# Altium footprint library LimeMicroAltiumLib.PcbLib: 876 footprints (part 48 of 57)
Each footprint in its own frame and in the unit in brackets; x right, y up, seen from the top. Pads: shape width x height; smd on the part's side, far side on the other; paste and mask are expansions set on the pad; w line width, h text height; cw(c..) or ccw(c..) is an arc to the next point about the centre after c.
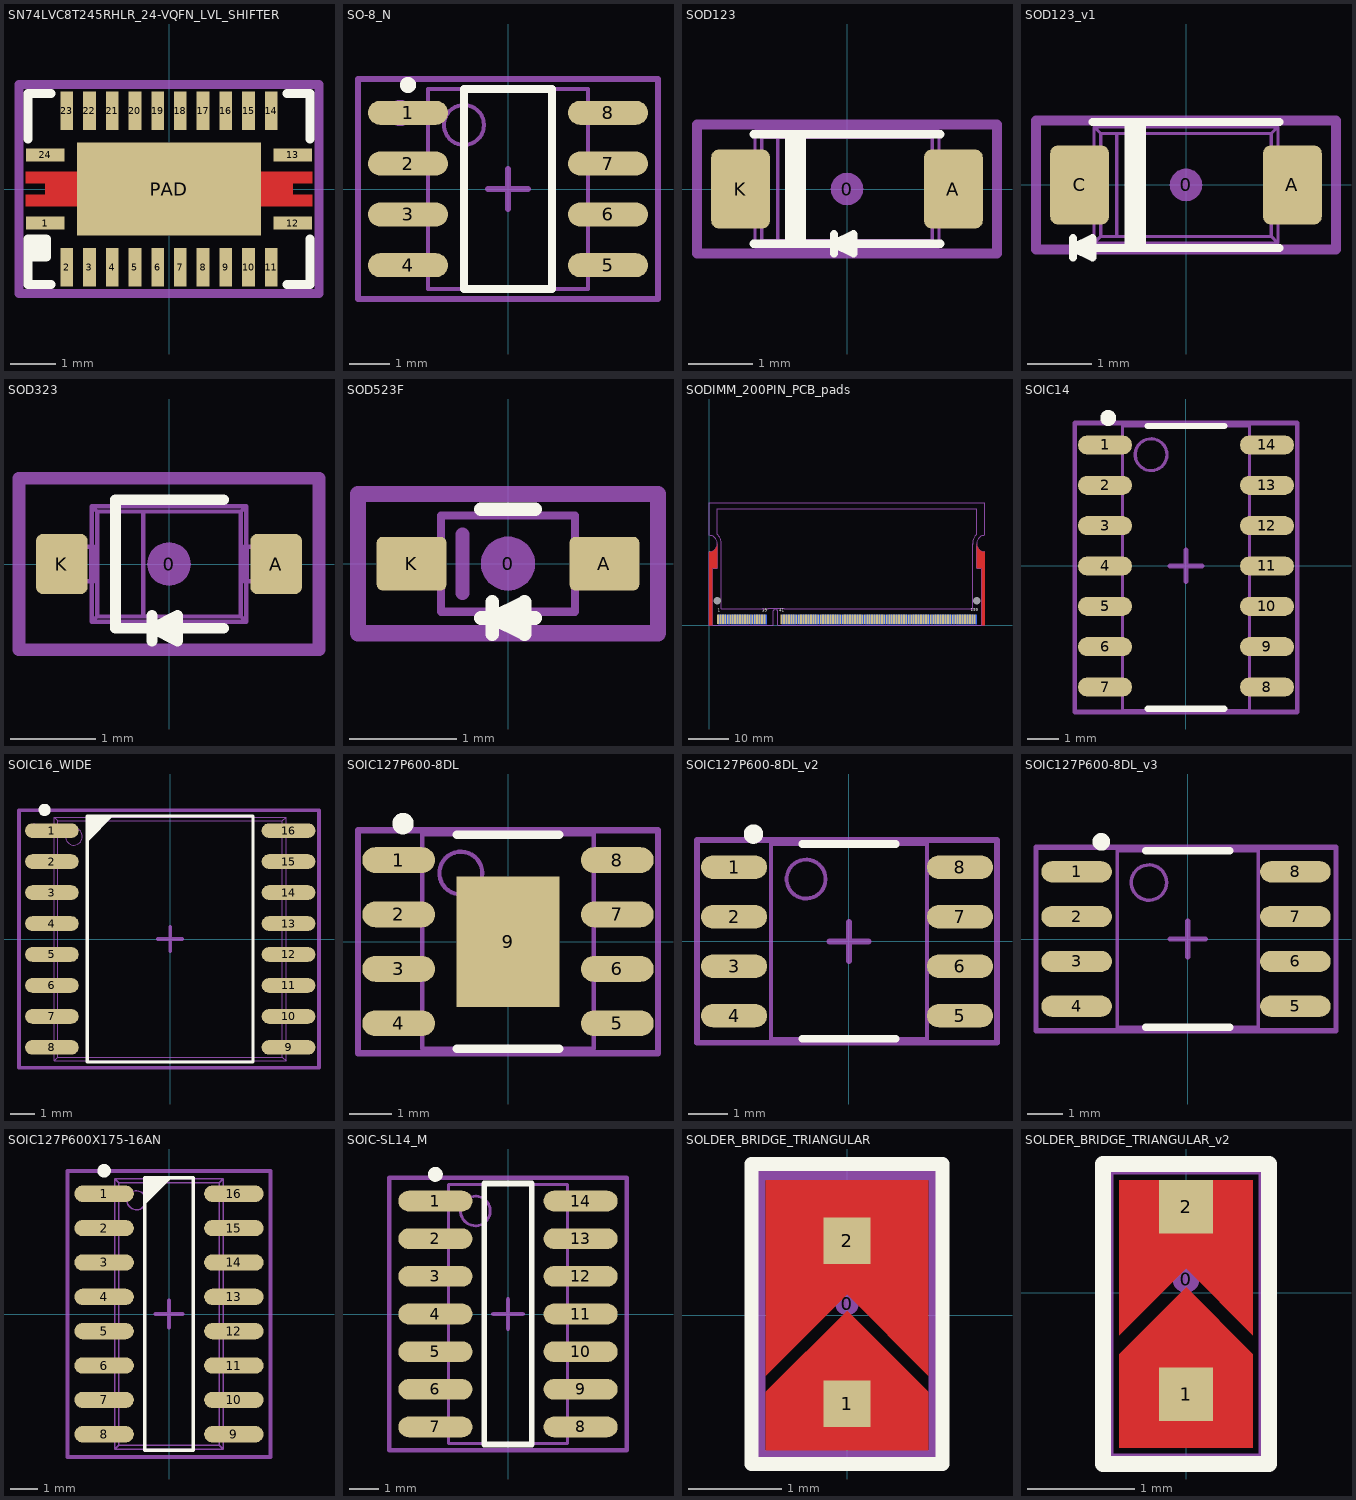
[diagram p47: the footprints below, top view; thin cyan lines are the x and y axes]

## SN74LVC8T245RHLR_24-VQFN_LVL_SHIFTER [mm]
pads (25):
  rect 0.85x0.28 smd mask+0.05: 1(-2.725,-0.75) 12(2.725,-0.75) 13(2.725,0.75) 24(-2.725,0.75)
  rect 0.28x0.85 smd mask+0.05: 2(-2.25,-1.725) 3(-1.75,-1.725) 4(-1.25,-1.725) 5(-0.75,-1.725) 6(-0.25,-1.725) 7(0.25,-1.725) 8(0.75,-1.725) 9(1.25,-1.725) 10(1.75,-1.725) 11(2.25,-1.725) 14(2.25,1.725) 15(1.75,1.725) 16(1.25,1.725) 17(0.75,1.725) 18(0.25,1.725) 19(-0.25,1.725) 20(-0.75,1.725) 21(-1.25,1.725) 22(-1.75,1.725) 23(-2.25,1.725)
  rect 4.05x2.05 smd paste-4 mask+0.05: PAD(0,0)
Top Layer:
  region: -3.15,0.375 -1.95,0.375 -1.95,0 -2.725,0 -2.725,0.125 -3.15,0.125
  region: -3.15,-0.375 -1.95,-0.375 -1.95,0 -2.725,0 -2.725,-0.125 -3.15,-0.125
  region: 3.15,-0.375 1.95,-0.375 1.95,0 2.725,0 2.725,-0.125 3.15,-0.125
  region: 3.15,0.375 1.95,0.375 1.95,0 2.725,0 2.725,0.125 3.15,0.125
Top Overlay:
  region: -3.1,-1.5 -2.7,-1.5 -2.7,-1.1 -3.1,-1.1
  lines w0.2: -3.1,-1.5 -2.7,-1.5 -2.7,-1.1 -3.1,-1.1 -3.1,-2.1 -2.6,-2.1 ; -3.1,1.1 -3.1,2.1 -2.6,2.1 ; 2.6,-2.1 3.1,-2.1 3.1,-1.1 ; 2.6,2.1 3.1,2.1 3.1,1.1
Top Paste:
  region: 3.15,-0.125 2.175,-0.125 2.175,-0.375 3.15,-0.375
  region: 3.15,0.375 2.175,0.375 2.175,0.125 3.15,0.125
  region: -3.15,0.375 -2.175,0.375 -2.175,0.125 -3.15,0.125
  region: -3.15,-0.125 -2.175,-0.125 -2.175,-0.375 -3.15,-0.375
  region: -1.9,-1
  region: 0,0
  region: 2,0
  region: -0.3,1.1
  region: -1.95,0.15 -1.95,0.95 -0.85,0.95 -0.85,0.15
  region: -1.95,-0.15 -1.95,-0.95 -0.85,-0.95 -0.85,-0.15
  region: -0.55,-0.15 -0.55,-0.95 0.55,-0.95 0.55,-0.15
  region: -0.55,0.15 -0.55,0.95 0.55,0.95 0.55,0.15
  region: 1.95,-0.15 1.95,-0.95 0.85,-0.95 0.85,-0.15
  region: 1.95,0.15 1.95,0.95 0.85,0.95 0.85,0.15
Top Solder:
  region: -3.2,0.425 -1.95,0.425 -1.95,0 -2.775,0 -2.775,0.075 -3.2,0.075
  region: -3.2,-0.425 -1.95,-0.425 -1.95,0 -2.775,0 -2.775,-0.075 -3.2,-0.075
  region: 3.2,-0.425 1.95,-0.425 1.95,0 2.775,0 2.775,-0.075 3.2,-0.075
  region: 3.2,0.425 1.95,0.425 1.95,0 2.775,0 2.775,0.075 3.2,0.075
Mechanical 15:
  lines w0.2: -0.6,0 0,0 ; 0,-0.6 0,0 ; 0,0.6 0,0 ; 0.6,0 0,0 ; -3.3,-2.3 3.3,-2.3 3.3,2.3 -3.3,2.3 -3.3,-2.3
  text ".Designator" at 0,0 h0.55
  text "24" at -3.1,0.3 h0.55
  text "23" at -2.8,1.2 h0.55
  text "14" at 1.8,1.3 h0.55
  text "13" at 2,0.4 h0.55
  text "12" at 2,-1.2 h0.55
  text "11" at 1.9,-2.1 h0.55
  text "2" at -2.5,-2.1 h0.55
  text "1" at -2.8,-1.2 h0.55
3D body "User Library-PVQFN-24.step": height 1.01, standoff -0.01, extent -2.825,-1.825 2.825,1.825

## SO-8_N [mm] "SOIC, 8-Leads, Body 4.9x3.9mm, Pitch 1.27mm, IPC Medium Density"
height 1.75
pads (8):
  oval 2x0.6 smd: 1(-2.5,1.905) 2(-2.5,0.635) 3(-2.5,-0.635) 4(-2.5,-1.905) 5(2.5,-1.905) 6(2.5,-0.635) 7(2.5,0.635) 8(2.5,1.905)
Top Overlay:
  circle w0.2: c-2.5,2.6 r0.1
  lines w0.2: -1.1,-2.5 -1.1,2.5 1.1,2.5 1.1,-2.5 -1.1,-2.5
Mechanical 13:
  circle w0.1: c-1.1,1.6 r0.5
  lines w0.1: -2,-2.5 -2,2.5 2,2.5 2,-2.5 -2,-2.5
Mechanical 15:
  circle w0.35: c-2.7,1.9 r0.15
  lines w0.15: -0.5,0 0.5,0 ; 0,-0.5 0,0.5 ; -3.75,-2.75 -3.75,2.75 3.75,2.75 3.75,-2.75 -3.75,-2.75
  text ".Designator" at 0,0 h0.55
3D body "CircuitWorks-SO-8.step": height 1.45, standoff 0, extent -2.889,-2.452 2.889,2.45

## SOD123 [mm] "SOD-123; 2 Leads; Body 2.7 x 1.6 mm, (LxW)"
height 1.35
pads (3):
  round 0.508 on Mech15: 0(0,0)
  rrect25% 0.91x1.22 smd: A(1.65,0) K(-1.65,0)
Top Overlay:
  lines w0.127: -1.45,-0.85 1.448,-0.85 ; -1.45,0.85 1.45,0.85 ; -0.9,-0.85 -0.9,0.85 ; -0.8,-0.85 -0.8,0.85 ; -0.7,-0.85 -0.7,0.85 ; -0.2,-1 -0.2,-0.7 ; 0.1,-0.85 -0.2,-0.85 ; -0.2,-0.85 0.1,-0.7 0.1,-1 -0.2,-0.85
Mechanical 13:
  lines w0.05: -1.766,-0.308 -1.766,0.308 ; -1.707,-0.308 -1.707,0.308 ; -1.517,-0.308 -1.517,0.308 ; -1.425,-0.308 -1.95,-0.308 -1.95,0.308 -1.425,0.308 ; 1.425,-0.308 1.95,-0.308 1.95,0.308 1.425,0.308 ; 1.517,-0.308 1.517,0.308 ; 1.707,-0.308 1.707,0.308 ; 1.766,-0.308 1.766,0.308 ; -1.425,-0.9 -1.425,0.9 ; -1.425,-0.9 -1.323,-0.798 ; -1.425,-0.9 1.425,-0.9 ; -1.425,0.9 1.425,0.9 ; -1.425,0.9 -1.323,0.798 ; -1.323,-0.798 -1.323,0.798 ; -1.323,-0.798 -1.072,-0.798 ; -1.323,0.798 -1.072,0.798 ; -1.072,-0.798 -1.072,0.798 ; -1.072,-0.798 1.322,-0.797 ; -1.072,0.798 1.322,0.797 ; 1.322,-0.797 1.425,-0.9 ; 1.322,-0.797 1.322,0.797 ; 1.322,0.797 1.425,0.9 ; 1.425,-0.9 1.425,0.9
Mechanical 15:
  lines w0.15: -2.325,-1 -2.325,1 2.325,1 2.325,-1 -2.325,-1
  text ".Designator" at 0,0 h0.55
  text "C" at -1.9,-0.275 h0.55
  text "A" at 1.475,-0.275 h0.55
3D body "SOD123.STEP": height 1.18, standoff 0, extent -1.95,-0.9 1.95,0.9

## SOD123_v1 [mm] "SOD-123; 2 Leads; Body 2.7 x 1.6 mm, (LxW)"
height 1.35
pads (3):
  round 0.508 on Mech15: 0(0,0)
  rrect25% 0.91x1.22 smd: A(1.65,0) C(-1.65,0)
Top Overlay:
  region: -0.95,0.975 -0.95,-0.975 -0.625,-0.975 -0.625,0.975
  lines w0.127: -1.75,-1.125 -1.75,-0.825 ; -1.45,0.975 1.45,0.975 ; 1.448,-0.975 -1.45,-0.975 -1.75,-0.975 ; -1.75,-0.975 -1.45,-1.125 -1.45,-0.825 -1.75,-0.975
Mechanical 13:
  lines w0.05: -1.766,-0.308 -1.766,0.308 ; -1.707,-0.308 -1.707,0.308 ; -1.517,-0.308 -1.517,0.308 ; -1.425,-0.308 -1.95,-0.308 -1.95,0.308 -1.425,0.308 ; 1.425,-0.308 1.95,-0.308 1.95,0.308 1.425,0.308 ; 1.517,-0.308 1.517,0.308 ; 1.707,-0.308 1.707,0.308 ; 1.766,-0.308 1.766,0.308 ; -1.425,-0.9 1.425,-0.9 ; -1.425,-0.9 -1.323,-0.798 ; -1.425,-0.9 -1.425,0.9 ; -1.425,0.9 -1.323,0.798 ; -1.425,0.9 1.425,0.9 ; -1.323,-0.798 -1.072,-0.798 ; -1.323,-0.798 -1.323,0.798 ; -1.323,0.798 -1.072,0.798 ; -1.072,-0.798 1.322,-0.797 ; -1.072,-0.798 -1.072,0.798 ; -1.072,0.798 1.322,0.797 ; 1.322,-0.797 1.322,0.797 ; 1.322,-0.797 1.425,-0.9 ; 1.322,0.797 1.425,0.9 ; 1.425,-0.9 1.425,0.9
Mechanical 15:
  lines w0.15: -2.325,-1 2.325,-1 2.325,1 -2.325,1 -2.325,-1
  text "A" at 1.475,-0.275 h0.55
  text "C" at -1.9,-0.275 h0.55
  text ".Designator" at 0,0 h0.55
3D body "SOD123.STEP": height 1.18, standoff 0, extent -1.95,-0.9 1.95,0.9

## SOD323 [mm] "SOD-323; 2 Leads; Body 1.8 x 1.35 mm, (LxW)"
height 1.15
pads (3):
  round 0.508 on Mech15: 0(0,0)
  rrect25% 0.6x0.7 smd: A(1.25,0) K(-1.25,0)
Top Overlay:
  lines w0.127: -0.2,-0.9 -0.2,-0.6 ; 0.1,-0.75 -0.2,-0.75 ; 0.635,-0.75 -0.625,-0.75 -0.625,0.75 0.635,0.75 ; -0.2,-0.75 0.1,-0.6 0.1,-0.9 -0.2,-0.75
Mechanical 13:
  lines w0.05: -1.157,-0.2 -1.157,0.2 ; -1.11,-0.2 -1.11,0.2 ; -0.91,-0.2 -0.91,0.2 ; -0.9,-0.2 -0.9,-0.675 ; -0.9,0.2 -0.9,0.675 ; 0.9,-0.2 0.9,-0.675 ; 0.9,0.2 0.9,0.675 ; 0.91,-0.2 0.91,0.2 ; 1.11,-0.2 1.11,0.2 ; 1.157,-0.2 1.157,0.2 ; -0.9,-0.675 0.9,-0.675 ; -0.9,-0.675 -0.838,-0.613 ; -0.9,0.675 -0.838,0.613 ; -0.9,0.675 0.9,0.675 ; -0.838,-0.613 -0.3,-0.613 ; -0.838,-0.613 -0.838,0.613 ; -0.838,0.613 -0.3,0.613 ; -0.3,-0.613 0.838,-0.613 ; -0.3,-0.613 -0.3,0.613 ; -0.3,0.613 0.838,0.613 ; 0.838,-0.613 0.9,-0.675 ; 0.838,-0.613 0.838,0.613 ; 0.838,0.613 0.9,0.675 ; -1.3,-0.2 -0.879,-0.2 -0.879,0.2 -1.3,0.2 -1.3,-0.2 ; 0.879,-0.2 0.879,0.2 1.3,0.2 1.3,-0.2 0.879,-0.2
Mechanical 15:
  lines w0.15: -1.75,-1 1.75,-1 1.75,1 -1.75,1 -1.75,-1
  text "C" at -1.425,-0.25 h0.55
  text "A" at 1.05,-0.25 h0.55
  text ".Designator" at 0,0 h0.55
3D body "SOD323.STEP": height 1.1, standoff 0, extent -1.3,-0.675 1.3,0.675

## SOD523F [mm] "SOD-523F; 2 Leads; Body 1.3 x 0.9 mm, (LxW)"
height 0.7
pads (3):
  round 0.508 on Mech15: 0(0,0)
  rrect20% 0.65x0.5 smd: A(0.9,0) K(-0.9,0)
Top Overlay:
  lines w0.127: -0.254,-0.508 0.254,-0.508 ; -0.254,0.508 0.254,0.508 ; -0.146,-0.658 -0.146,-0.358 ; 0.154,-0.508 -0.146,-0.508 ; -0.146,-0.508 0.154,-0.358 0.154,-0.658 -0.146,-0.508
Mechanical 13:
  lines w0.076: -0.625,-0.175 -0.85,-0.175 -0.85,0.175 -0.625,0.175 ; -0.625,-0.175 -0.625,-0.45 0.625,-0.45 0.625,-0.175 ; -0.625,-0.175 -0.625,0.175 ; -0.625,0.175 -0.625,0.45 0.625,0.45 0.625,0.175 ; 0.625,-0.175 0.85,-0.175 0.85,0.175 0.625,0.175 ; 0.625,-0.175 0.625,0.175
  lines w0.127: -0.425,-0.275 -0.425,0.275
Mechanical 15:
  lines w0.15: -1.4,-0.65 -1.4,0.65 1.4,0.65 1.4,-0.65 -1.4,-0.65
  text ".Designator" at 0,0 h0.55
  text "A" at 0.725,-0.3 h0.55
  text "C" at -1.075,-0.275 h0.55
3D body "SOD-523F.STEP": height 0.7, standoff 0, extent -0.85,-0.45 0.85,0.45

## SODIMM_200PIN_PCB_pads [mm] "SODIMM 200PIN card PCB fingers"
pads (202):
  rect 0.45x2.3 smd paste+0.3 mask+0.3: 1(2.15,1.4) 3(2.75,1.4) 5(3.35,1.4) 7(3.95,1.4) 9(4.55,1.4) 11(5.15,1.4) 13(5.75,1.4) 15(6.35,1.4) 17(6.95,1.4) 19(7.55,1.4) 21(8.15,1.4) 23(8.75,1.4) 25(9.35,1.4) 27(9.95,1.4) 29(10.55,1.4) 31(11.15,1.4) 33(11.75,1.4) 35(12.35,1.4) 37(12.95,1.4) 39(13.55,1.4) 41(17.75,1.4) 43(18.35,1.4) 45(18.95,1.4) 47(19.55,1.4) 49(20.15,1.4) 51(20.75,1.4) 53(21.35,1.4) 55(21.95,1.4) 57(22.55,1.4) 59(23.15,1.4) 61(23.75,1.4) 63(24.35,1.4) 65(24.95,1.4) 67(25.55,1.4) 69(26.15,1.4) 71(26.75,1.4) 73(27.35,1.4) 75(27.95,1.4) 77(28.55,1.4) 79(29.15,1.4) 81(29.75,1.4) 83(30.35,1.4) 85(30.95,1.4) 87(31.55,1.4) 89(32.15,1.4) 91(32.75,1.4) 93(33.35,1.4) 95(33.95,1.4) 97(34.55,1.4) 99(35.15,1.4) 101(35.75,1.4) 103(36.35,1.4) 105(36.95,1.4) 107(37.55,1.4) 109(38.15,1.4) 111(38.75,1.4) 113(39.35,1.4) 115(39.95,1.4) 117(40.55,1.4) 119(41.15,1.4) 121(41.75,1.4) 123(42.35,1.4) 125(42.95,1.4) 127(43.55,1.4) 129(44.15,1.4) 131(44.75,1.4) 133(45.35,1.4) 135(45.95,1.4) 137(46.55,1.4) 139(47.15,1.4) 141(47.75,1.4) 143(48.35,1.4) 145(48.95,1.4) 147(49.55,1.4) 149(50.15,1.4) 151(50.75,1.4) 153(51.35,1.4) 155(51.95,1.4) 157(52.55,1.4) 159(53.15,1.4) 161(53.75,1.4) 163(54.35,1.4) 165(54.95,1.4) 167(55.55,1.4) 169(56.15,1.4) 171(56.75,1.4) 173(57.35,1.4) 175(57.95,1.4) 177(58.55,1.4) 179(59.15,1.4) 181(59.75,1.4) 183(60.35,1.4) 185(60.95,1.4) 187(61.55,1.4) 189(62.15,1.4) 191(62.75,1.4) 193(63.35,1.4) 195(63.95,1.4) 197(64.55,1.4) 199(65.15,1.4)
  rect 0.45x2.3 smd far side paste+0.3 mask+0.3: 2(2.45,1.4) 4(3.05,1.4) 6(3.65,1.4) 8(4.25,1.4) 10(4.85,1.4) 12(5.45,1.4) 14(6.05,1.4) 16(6.65,1.4) 18(7.25,1.4) 20(7.85,1.4) 22(8.45,1.4) 24(9.05,1.4) 26(9.65,1.4) 28(10.25,1.4) 30(10.85,1.4) 32(11.45,1.4) 34(12.05,1.4) 36(12.65,1.4) 38(13.25,1.4) 40(13.85,1.4) 42(18.05,1.4) 44(18.65,1.4) 46(19.25,1.4) 48(19.85,1.4) 50(20.45,1.4) 52(21.05,1.4) 54(21.65,1.4) 56(22.25,1.4) 58(22.85,1.4) 60(23.45,1.4) 62(24.05,1.4) 64(24.65,1.4) 66(25.25,1.4) 68(25.85,1.4) 70(26.45,1.4) 72(27.05,1.4) 74(27.65,1.4) 76(28.25,1.4) 78(28.85,1.4) 80(29.45,1.4) 82(30.05,1.4) 84(30.65,1.4) 86(31.25,1.4) 88(31.85,1.4) 90(32.45,1.4) 92(33.05,1.4) 94(33.65,1.4) 96(34.25,1.4) 98(34.85,1.4) 100(35.45,1.4) 102(36.05,1.4) 104(36.65,1.4) 106(37.25,1.4) 108(37.85,1.4) 110(38.45,1.4) 112(39.05,1.4) 114(39.65,1.4) 116(40.25,1.4) 118(40.85,1.4) 120(41.45,1.4) 122(42.05,1.4) 124(42.65,1.4) 126(43.25,1.4) 128(43.85,1.4) 130(44.45,1.4) 132(45.05,1.4) 134(45.65,1.4) 136(46.25,1.4) 138(46.85,1.4) 140(47.45,1.4) 142(48.05,1.4) 144(48.65,1.4) 146(49.25,1.4) 148(49.85,1.4) 150(50.45,1.4) 152(51.05,1.4) 154(51.65,1.4) 156(52.25,1.4) 158(52.85,1.4) 160(53.45,1.4) 162(54.05,1.4) 164(54.65,1.4) 166(55.25,1.4) 168(55.85,1.4) 170(56.45,1.4) 172(57.05,1.4) 174(57.65,1.4) 176(58.25,1.4) 178(58.85,1.4) 180(59.45,1.4) 182(60.05,1.4) 184(60.65,1.4) 186(61.25,1.4) 188(61.85,1.4) 190(62.45,1.4) 192(63.05,1.4) 194(63.65,1.4) 196(64.25,1.4) 198(64.85,1.4) 200(65.45,1.4)
  round 1.5 hole 1.8 unplated: MH1(2,6) MH2(65.6,6)
Top Layer:
  pour cut-out: 67.6,0 66.8,0 66.8,14 65.6,14 65.592,20 65.602,19.804 65.678,19.419 65.828,19.057 66.046,18.731 66.323,18.454 66.649,18.236 67.011,18.086 67.396,18.01 67.592,18 67.6,18
  pour cut-out: 0,0 0.8,0 0.8,14 2,14 2.008,20 1.998,19.804 1.922,19.419 1.772,19.057 1.554,18.731 1.277,18.454 0.951,18.236 0.589,18.086 0.204,18.01 0.008,18 0,18
Bottom Layer:
  pour cut-out: 67.6,0 66.8,0 66.8,14 65.6,14 65.592,20 65.602,19.804 65.678,19.419 65.828,19.057 66.046,18.731 66.323,18.454 66.649,18.236 67.011,18.086 67.396,18.01 67.592,18 67.6,18
  pour cut-out: 0,0 0.8,0 0.8,14 2,14 2.008,20 1.998,19.804 1.922,19.419 1.772,19.057 1.554,18.731 1.277,18.454 0.951,18.236 0.589,18.086 0.204,18.01 0.008,18 0,18
Top Overlay:
  text "199" at 64.2,3.4 h0.7
  text "41" at 17.2,3.3 h0.7
  text "39" at 13,3.3 h0.7
  text "1" at 2.1,3.3 h0.7
Mechanical 13:
  lines w0.2: 0,0 0,18 ccw(c0,20) 0,22 0,30 67.6,30 67.6,22 ccw(c67.6,20) 67.6,18 67.6,0 16.75,0 16.75,3.5 ccw(c16.25,3.5) 15.75,3.5 15.75,0 0,0
Mechanical 15:
  lines w0.15: 0,1.8 0.8,0.5 ; 0,3.3 0.8,2 ; 0,4.8 0.8,3.5 ; 0,6.3 0.8,5 ; 0,7.8 0.8,6.5 ; 0,9.3 0.8,8 ; 0,10.8 0.8,9.5 ; 0,12.3 0.8,11 ; 0,13.8 0.8,12.5 ; 0,15.3 0.8,14 ; 0,16.5 0.494,15.697 ; 0,17.5 0.494,16.697 ; 0.8,0 0.8,14 ; 1.5,14.8 1.994,13.997 ; 1.5,15.9 1.994,15.097 ; 1.5,16.9 1.994,16.097 ; 1.5,18 1.994,17.197 ; 2,19.4 2,14 0.8,14 ; 65.6,19.4 65.6,14 66.8,14 ; 65.606,13.997 66.1,14.8 ; 65.606,15.097 66.1,15.9 ; 65.606,16.097 66.1,16.9 ; 65.606,17.197 66.1,18 ; 66.8,0 66.8,14 ; 66.8,0.5 67.6,1.8 ; 66.8,2 67.6,3.3 ; 66.8,3.5 67.6,4.8 ; 66.8,5 67.6,6.3 ; 66.8,6.5 67.6,7.8 ; 66.8,8 67.6,9.3 ; 66.8,9.5 67.6,10.8 ; 66.8,11 67.6,12.3 ; 66.8,12.5 67.6,13.8 ; 67.106,15.697 67.6,16.5 ; 67.106,16.697 67.6,17.5 ; 67.6,15.3 66.8,14
  lines w0.2: 1.997,22.239 cw(c0,20) 3,20 3,4 14.45,4 14.45,4.2 18.45,4.2 18.45,4 64.6,4 64.602,20 ; 2,22.242 2,28.5 65.6,28.5 65.6,22.229 ; 64.602,19.889 cw(c67.6,20) 65.592,22.229 ; 0,0 15.75,0 15.75,3.5 cw(c16.25,3.5) 16.75,3.5 16.75,0 67.6,0 67.6,18 cw(c67.6,20) 67.6,22 67.6,30 0,30 0,22 cw(c0,20) 0,18 0,0
  text "Keep Out" at 67,14.2 h0.5
  text "Keep Out" at 1.594,14.203 h0.5

## SOIC14 [mm] "14-Pin Small Outline Integrated Circuit 1.27 mm Pitch"
height 1.55
pads (14):
  oval 1.7x0.6 smd: 1(-2.55,3.81) 2(-2.55,2.54) 3(-2.55,1.27) 4(-2.55,0) 5(-2.55,-1.27) 6(-2.55,-2.54) 7(-2.55,-3.81) 8(2.55,-3.81) 9(2.55,-2.54) 10(2.55,-1.27) 11(2.55,0) 12(2.55,1.27) 13(2.55,2.54) 14(2.55,3.81)
Top Overlay:
  circle w0.25: c-2.45,4.66 r0.125
  lines w0.2: -1.2,-4.5 1.2,-4.5 ; -1.2,4.405 1.2,4.405
Mechanical 13:
  circle w0.1: c-1.1,3.505 r0.5
  lines w0.1: -2,-4.545 2,-4.545 2,4.405 -2,4.405 -2,-4.545
Mechanical 15:
  circle w0.35: c-2.6,3.805 r0.1
  lines w0.15: -0.5,0 0.5,0 ; 0,-0.5 0,0.5 ; -3.5,-4.6 3.5,-4.6 3.5,4.505 -3.5,4.505 -3.5,-4.6
  text ".Designator" at 0,0 h0.55
3D body "User Library-SOIC127P600-14.step": height 1.65, standoff 0, extent -3.065,-4.325 3.015,4.275

## SOIC16_WIDE [mm] "SOIC, 1.27mm pitch, 16 pin"
height 1.75
pads (16):
  oval 2.2x0.6 smd: 1(-4.85,4.445) 2(-4.85,3.175) 3(-4.85,1.905) 4(-4.85,0.635) 5(-4.85,-0.635) 6(-4.85,-1.905) 7(-4.85,-3.175) 8(-4.85,-4.445) 9(4.85,-4.445) 10(4.85,-3.175) 11(4.85,-1.905) 12(4.85,-0.635) 13(4.85,0.635) 14(4.85,1.905) 15(4.85,3.175) 16(4.85,4.445)
Top Overlay:
  circle w0.25: c-5.15,5.295 r0.125
  region: -3.35,5.035 -2.35,5.035 -3.35,4.035
  lines w0.127: -3.4,-5.035 -3.4,5.035 3.4,5.035 3.4,-5.035 -3.4,-5.035
Mechanical 13:
  circle w0.05: c-3.95,4.2 r0.35
  lines w0.05: -5.381,-4.655 -5.381,-4.235 ; -5.381,-3.385 -5.381,-2.965 ; -5.381,-2.115 -5.381,-1.695 ; -5.381,-0.845 -5.381,-0.425 ; -5.381,0.425 -5.381,0.845 ; -5.381,1.695 -5.381,2.115 ; -5.381,2.965 -5.381,3.385 ; -5.381,4.235 -5.381,4.655 ; -5.293,-4.655 -5.293,-4.235 ; -5.293,-3.385 -5.293,-2.965 ; -5.293,-2.115 -5.293,-1.695 ; -5.293,-0.845 -5.293,-0.425 ; -5.293,0.425 -5.293,0.845 ; -5.293,1.695 -5.293,2.115 ; -5.293,2.965 -5.293,3.385 ; -5.293,4.235 -5.293,4.655 ; -5.153,-4.655 -5.153,-4.235 ; -5.153,-3.385 -5.153,-2.965 ; -5.153,-2.115 -5.153,-1.695 ; -5.153,-0.845 -5.153,-0.425 ; -5.153,0.425 -5.153,0.845 ; -5.153,1.695 -5.153,2.115 ; -5.153,2.965 -5.153,3.385 ; -5.153,4.235 -5.153,4.655 ; -4.863,-4.655 -4.863,-4.235 ; -4.863,-3.385 -4.863,-2.965 ; -4.863,-2.115 -4.863,-1.695 ; -4.863,-0.845 -4.863,-0.425 ; -4.863,0.425 -4.863,0.845 ; -4.863,1.695 -4.863,2.115 ; -4.863,2.965 -4.863,3.385 ; -4.863,4.235 -4.863,4.655 ; -4.75,-4.655 -5.75,-4.655 -5.75,-4.235 -4.75,-4.235 ; -4.75,-3.385 -5.75,-3.385 -5.75,-2.965 -4.75,-2.965 ; -4.75,-2.115 -5.75,-2.115 -5.75,-1.695 -4.75,-1.695 ; -4.75,-0.845 -5.75,-0.845 -5.75,-0.425 -4.75,-0.425 ; -4.75,0.425 -5.75,0.425 -5.75,0.845 -4.75,0.845 ; -4.75,1.695 -5.75,1.695 -5.75,2.115 -4.75,2.115 ; -4.75,2.965 -5.75,2.965 -5.75,3.385 -4.75,3.385 ; -4.75,4.235 -5.75,4.235 -5.75,4.655 -4.75,4.655 ; 4.75,-4.655 5.75,-4.655 5.75,-4.235 4.75,-4.235 ; 4.75,-3.385 5.75,-3.385 5.75,-2.965 4.75,-2.965 ; 4.75,-2.115 5.75,-2.115 5.75,-1.695 4.75,-1.695 ; 4.75,-0.845 5.75,-0.845 5.75,-0.425 4.75,-0.425 ; 4.75,0.425 5.75,0.425 5.75,0.845 4.75,0.845 ; 4.75,1.695 5.75,1.695 5.75,2.115 4.75,2.115 ; 4.75,2.965 5.75,2.965 5.75,3.385 4.75,3.385 ; 4.75,4.235 5.75,4.235 5.75,4.655 4.75,4.655 ; 4.863,-4.655 4.863,-4.235 ; 4.863,-3.385 4.863,-2.965 ; 4.863,-2.115 4.863,-1.695 ; 4.863,-0.845 4.863,-0.425 ; 4.863,0.425 4.863,0.845 ; 4.863,1.695 4.863,2.115 ; 4.863,2.965 4.863,3.385 ; 4.863,4.235 4.863,4.655 ; 5.153,-4.655 5.153,-4.235 ; 5.153,-3.385 5.153,-2.965 ; 5.153,-2.115 5.153,-1.695 ; 5.153,-0.845 5.153,-0.425 ; 5.153,0.425 5.153,0.845 ; 5.153,1.695 5.153,2.115 ; 5.153,2.965 5.153,3.385 ; 5.153,4.235 5.153,4.655 ; 5.293,-4.655 5.293,-4.235 ; 5.293,-3.385 5.293,-2.965 ; 5.293,-2.115 5.293,-1.695 ; 5.293,-0.845 5.293,-0.425 ; 5.293,0.425 5.293,0.845 ; 5.293,1.695 5.293,2.115 ; 5.293,2.965 5.293,3.385 ; 5.293,4.235 5.293,4.655 ; 5.381,-4.655 5.381,-4.235 ; 5.381,-3.385 5.381,-2.965 ; 5.381,-2.115 5.381,-1.695 ; 5.381,-0.845 5.381,-0.425 ; 5.381,0.425 5.381,0.845 ; 5.381,1.695 5.381,2.115 ; 5.381,2.965 5.381,3.385 ; 5.381,4.235 5.381,4.655 ; -4.75,-5 -4.75,5 ; -4.75,-5 -4.601,-4.851 ; -4.75,-5 4.75,-5 ; -4.75,5 -4.601,4.851 ; -4.75,5 4.75,5 ; -4.601,-4.851 -4.601,4.851 ; -4.601,-4.851 4.601,-4.851 ; -4.601,4.851 4.601,4.851 ; 4.601,-4.851 4.75,-5 ; 4.601,-4.851 4.601,4.851 ; 4.601,4.851 4.75,5 ; 4.75,-5 4.75,5
Mechanical 15:
  circle w0.254: c-5.575,4.475 r0.125
  lines w0.15: -0.5,0 0,0 ; 0,-0.5 0,0 ; 0,0.5 0,0 ; 0.5,0 0,0 ; -6.2,-5.285 -6.2,5.285 6.1,5.285 6.1,-5.285 -6.2,-5.285
  text ".Designator" at 0,0 h0.55
3D body "User Library-SOIC16_Wide_JEDEC_MS-013AA.step": height 2.59, standoff -0.06, extent -5.315,-5.25 5.315,5.25

## SOIC127P600-8DL [mm] "8-Pin Small Outline Integrated Circuit 1.27 mm Pitch"
height 1.55
pads (9):
  oval 1.7x0.6 smd: 1(-2.55,1.905) 2(-2.55,0.635) 3(-2.55,-0.635) 4(-2.55,-1.905) 5(2.55,-1.905) 6(2.55,-0.635) 7(2.55,0.635) 8(2.55,1.905)
  rect 2.4x3.05 smd: 9(0,0)
Top Overlay:
  circle w0.25: c-2.45,2.755 r0.125
  lines w0.2: -1.2,-2.5 1.2,-2.5 ; -1.2,2.5 1.2,2.5
Mechanical 13:
  circle w0.1: c-1.1,1.6 r0.5
  lines w0.1: -2,-2.5 2,-2.5 2,2.5 -2,2.5 -2,-2.5
Mechanical 15:
  circle w0.35: c-2.6,1.9 r0.1
  lines w0.15: -0.5,0 0.5,0 ; 0,-0.5 0,0.5 ; -3.5,-2.6 3.5,-2.6 3.5,2.6 -3.5,2.6 -3.5,-2.6
  text ".Designator" at 0,0 h0.55
3D body "SOIC-8.STEP": height 1.75, standoff 0, extent -3,-2.45 3,2.45

## SOIC127P600-8DL_v2 [mm] "8-Pin Small Outline Integrated Circuit 1.27 mm Pitch"
height 1.55
pads (8):
  oval 1.7x0.6 smd: 1(-2.95,1.905) 2(-2.95,0.635) 3(-2.95,-0.635) 4(-2.95,-1.905) 5(2.85,-1.905) 6(2.85,-0.635) 7(2.85,0.635) 8(2.85,1.905)
Top Overlay:
  circle w0.25: c-2.45,2.755 r0.125
  lines w0.2: -1.2,-2.5 1.2,-2.5 ; -1.2,2.5 1.2,2.5
Mechanical 13:
  circle w0.1: c-1.1,1.6 r0.5
  lines w0.1: -2,-2.5 2,-2.5 2,2.5 -2,2.5 -2,-2.5
Mechanical 15:
  circle w0.35: c-3.1,1.9 r0.1
  lines w0.15: -0.5,0 0.5,0 ; 0,-0.5 0,0.5 ; -3.9,-2.6 3.8,-2.6 3.8,2.6 -3.9,2.6 -3.9,-2.6
  text ".Designator" at 0,0 h0.55
3D body "SOIC-8.STEP": height 1.75, standoff 0, extent -3,-2.45 3,2.45

## SOIC127P600-8DL_v3 [mm] "8-Pin Small Outline Integrated Circuit 1.27 mm Pitch"
height 1.55
pads (8):
  oval 2x0.6 smd: 1(-3.15,1.905) 2(-3.15,0.635) 3(-3.15,-0.635) 4(-3.15,-1.905) 5(3.05,-1.905) 6(3.05,-0.635) 7(3.05,0.635) 8(3.05,1.905)
Top Overlay:
  circle w0.25: c-2.45,2.755 r0.125
  lines w0.2: -1.2,-2.5 1.2,-2.5 ; -1.2,2.5 1.2,2.5
Mechanical 13:
  circle w0.1: c-1.1,1.6 r0.5
  lines w0.1: -2,-2.5 -2,2.5 2,2.5 2,-2.5 -2,-2.5
Mechanical 15:
  circle w0.35: c-3.1,1.9 r0.1
  lines w0.15: -0.5,0 0.5,0 ; 0,-0.5 0,0.5 ; -4.3,-2.6 -4.3,2.6 4.2,2.6 4.2,-2.6 -4.3,-2.6
  text ".Designator" at 0,0 h0.55
3D body "SOIC-8.STEP": height 1.75, standoff 0, extent -3,-2.45 3,2.45

## SOIC127P600X175-16AN [mm] "SOIC, 1.27mm pitch, 16 pin, Body 9.9x3.90mm"
height 1.75
pads (16):
  oval 2.2x0.6 smd: 1(-2.4,4.445) 2(-2.4,3.175) 3(-2.4,1.905) 4(-2.4,0.635) 5(-2.4,-0.635) 6(-2.4,-1.905) 7(-2.4,-3.175) 8(-2.4,-4.445) 9(2.4,-4.445) 10(2.4,-3.175) 11(2.4,-1.905) 12(2.4,-0.635) 13(2.4,0.635) 14(2.4,1.905) 15(2.4,3.175) 16(2.4,4.445)
Top Overlay:
  circle w0.25: c-2.4,5.295 r0.125
  region: -0.9,5.035 0.1,5.035 -0.9,4.035
  lines w0.127: -0.9,-5.035 -0.9,5.035 0.9,5.035 0.9,-5.035 -0.9,-5.035
Mechanical 13:
  circle w0.05: c-1.2,4.2 r0.35
  lines w0.05: -2.631,-4.655 -2.631,-4.235 ; -2.631,-3.385 -2.631,-2.965 ; -2.631,-2.115 -2.631,-1.695 ; -2.631,-0.845 -2.631,-0.425 ; -2.631,0.425 -2.631,0.845 ; -2.631,1.695 -2.631,2.115 ; -2.631,2.965 -2.631,3.385 ; -2.631,4.235 -2.631,4.655 ; -2.543,-4.655 -2.543,-4.235 ; -2.543,-3.385 -2.543,-2.965 ; -2.543,-2.115 -2.543,-1.695 ; -2.543,-0.845 -2.543,-0.425 ; -2.543,0.425 -2.543,0.845 ; -2.543,1.695 -2.543,2.115 ; -2.543,2.965 -2.543,3.385 ; -2.543,4.235 -2.543,4.655 ; -2.403,-4.655 -2.403,-4.235 ; -2.403,-3.385 -2.403,-2.965 ; -2.403,-2.115 -2.403,-1.695 ; -2.403,-0.845 -2.403,-0.425 ; -2.403,0.425 -2.403,0.845 ; -2.403,1.695 -2.403,2.115 ; -2.403,2.965 -2.403,3.385 ; -2.403,4.235 -2.403,4.655 ; -2.113,-4.655 -2.113,-4.235 ; -2.113,-3.385 -2.113,-2.965 ; -2.113,-2.115 -2.113,-1.695 ; -2.113,-0.845 -2.113,-0.425 ; -2.113,0.425 -2.113,0.845 ; -2.113,1.695 -2.113,2.115 ; -2.113,2.965 -2.113,3.385 ; -2.113,4.235 -2.113,4.655 ; -2,-4.655 -3,-4.655 -3,-4.235 -2,-4.235 ; -2,-3.385 -3,-3.385 -3,-2.965 -2,-2.965 ; -2,-2.115 -3,-2.115 -3,-1.695 -2,-1.695 ; -2,-0.845 -3,-0.845 -3,-0.425 -2,-0.425 ; -2,0.425 -3,0.425 -3,0.845 -2,0.845 ; -2,1.695 -3,1.695 -3,2.115 -2,2.115 ; -2,2.965 -3,2.965 -3,3.385 -2,3.385 ; -2,4.235 -3,4.235 -3,4.655 -2,4.655 ; 2,-4.655 3,-4.655 3,-4.235 2,-4.235 ; 2,-3.385 3,-3.385 3,-2.965 2,-2.965 ; 2,-2.115 3,-2.115 3,-1.695 2,-1.695 ; 2,-0.845 3,-0.845 3,-0.425 2,-0.425 ; 2,0.425 3,0.425 3,0.845 2,0.845 ; 2,1.695 3,1.695 3,2.115 2,2.115 ; 2,2.965 3,2.965 3,3.385 2,3.385 ; 2,4.235 3,4.235 3,4.655 2,4.655 ; 2.113,-4.655 2.113,-4.235 ; 2.113,-3.385 2.113,-2.965 ; 2.113,-2.115 2.113,-1.695 ; 2.113,-0.845 2.113,-0.425 ; 2.113,0.425 2.113,0.845 ; 2.113,1.695 2.113,2.115 ; 2.113,2.965 2.113,3.385 ; 2.113,4.235 2.113,4.655 ; 2.403,-4.655 2.403,-4.235 ; 2.403,-3.385 2.403,-2.965 ; 2.403,-2.115 2.403,-1.695 ; 2.403,-0.845 2.403,-0.425 ; 2.403,0.425 2.403,0.845 ; 2.403,1.695 2.403,2.115 ; 2.403,2.965 2.403,3.385 ; 2.403,4.235 2.403,4.655 ; 2.543,-4.655 2.543,-4.235 ; 2.543,-3.385 2.543,-2.965 ; 2.543,-2.115 2.543,-1.695 ; 2.543,-0.845 2.543,-0.425 ; 2.543,0.425 2.543,0.845 ; 2.543,1.695 2.543,2.115 ; 2.543,2.965 2.543,3.385 ; 2.543,4.235 2.543,4.655 ; 2.631,-4.655 2.631,-4.235 ; 2.631,-3.385 2.631,-2.965 ; 2.631,-2.115 2.631,-1.695 ; 2.631,-0.845 2.631,-0.425 ; 2.631,0.425 2.631,0.845 ; 2.631,1.695 2.631,2.115 ; 2.631,2.965 2.631,3.385 ; 2.631,4.235 2.631,4.655 ; -2,-5 -2,5 ; -2,-5 -1.851,-4.851 ; -2,-5 2,-5 ; -2,5 -1.851,4.851 ; -2,5 2,5 ; -1.851,-4.851 1.851,-4.851 ; -1.851,-4.851 -1.851,4.851 ; -1.851,4.851 1.851,4.851 ; 1.851,-4.851 2,-5 ; 1.851,-4.851 1.851,4.851 ; 1.851,4.851 2,5 ; 2,-5 2,5
Mechanical 15:
  circle w0.254: c-2.825,4.475 r0.125
  lines w0.15: -0.5,0 0,0 ; 0,-0.5 0,0 ; 0,0.5 0,0 ; 0.5,0 0,0 ; -3.75,-5.285 -3.75,5.285 3.75,5.285 3.75,-5.285 -3.75,-5.285
  text ".Designator" at 0,0 h0.55
3D body "SOIC-16.STEP": height 1.75, standoff 0, extent -3,-5 3,5

## SOIC-SL14_M [mm] "SOIC, 14-Leads, Body 8.7x3.9mm, Pitch 1.27mm, IPC Low Density"
height 1.75
pads (14):
  oval 2.5x0.7 smd: 1(-2.45,3.81) 2(-2.45,2.54) 3(-2.45,1.27) 4(-2.45,0) 5(-2.45,-1.27) 6(-2.45,-2.54) 7(-2.45,-3.81) 8(2.45,-3.81) 9(2.45,-2.54) 10(2.45,-1.27) 11(2.45,0) 12(2.45,1.27) 13(2.45,2.54) 14(2.45,3.81)
Top Overlay:
  circle w0.25: c-2.45,4.71 r0.125
  lines w0.2: -0.8,-4.4 -0.8,4.4 0.8,4.4 0.8,-4.4 -0.8,-4.4
Mechanical 13:
  circle w0.1: c-1.1,3.475 r0.5
  lines w0.1: -2,-4.375 -2,4.375 2,4.375 2,-4.375 -2,-4.375
Mechanical 15:
  circle w0.2: c-2.5,3.8 r0.09
  lines w0.15: -0.5,0 0.5,0 ; 0,-0.5 0,0.5 ; -4,-4.6 -4,4.6 4,4.6 4,-4.6 -4,-4.6
  text ".Designator" at 0,0 h0.55
3D body "User Library-SOIC14_JEDEC_MS-012AB.step": height 1.75, standoff -0.01, extent -3.1,-4.375 3.1,4.375

## SOLDER_BRIDGE_TRIANGULAR [mm]
pads (3):
  round 0.254 on Mech15: 0(0,0.125)
  rect 0.5x0.5 smd mask+0.05: 1(0,-0.95) 2(0,0.8)
Top Layer:
  region: 0,0.05 -0.875,-0.825 -0.875,-1.45 0,-1.45
  region: 0,0.05 0.875,-0.825 0.875,-1.45 0,-1.45
  region: 0,0.225 -0.875,-0.65 -0.875,1.45 0,1.45
  region: 0,0.225 0.875,-0.65 0.875,1.45 0,1.45
Top Overlay:
  lines w0.15: -1.025,-1.6 1.025,-1.6 1.025,1.625 -1.025,1.625 -1.025,-1.6
Top Solder:
  region: -0.925,-1.5 -0.925,1.525 0.925,1.525 0.925,-1.5
Mechanical 15:
  lines w0.15: -0.95,-1.525 -0.95,1.525 0.95,1.525 0.95,-1.525 -0.95,-1.525
  text ".Designator" at 0,0.125 h0.55
3D body "RES 0402 (1005 metric).STEP": height 0.4, standoff 0, extent -0.275,-0.525 0.275,0.525

## SOLDER_BRIDGE_TRIANGULAR_v2 [mm]
pads (3):
  round 0.254 on Mech15: 0(0,0.125)
  rect 0.5x0.5 smd mask+0.05: 1(0,-0.95) 2(0,0.8)
Top Layer:
  region: 0,0.05 -0.625,-0.575 -0.625,-1.45 0,-1.45
  region: 0,0.225 -0.625,-0.4 -0.625,1.05 0,1.05
  region: 0,0.225 0.625,-0.4 0.625,1.05 0,1.05
  region: 0,0.05 0.625,-0.575 0.625,-1.45 0,-1.45
Top Overlay:
  lines w0.15: -0.775,-1.6 -0.775,1.2 0.775,1.2 0.775,-1.6 -0.775,-1.6
Top Solder:
  region: -0.675,-1.5 -0.675,1.1 0.675,1.1 0.675,-1.5
Mechanical 15:
  lines w0.15: -0.75,-1.575 0.75,-1.575 0.75,1.175 -0.75,1.175 -0.75,-1.575
  text ".Designator" at 0,0.125 h0.55
3D body "RES 0402 (1005 metric).STEP": height 0.4, standoff 0, extent -0.275,-0.525 0.275,0.525